# Altium footprint library pcb_esp32.PcbLib: 1 footprints
Each footprint in its own frame and in the unit in brackets; x right, y up, seen from the top. Pads: shape width x height; smd on the part's side, far side on the other; paste and mask are expansions set on the pad; w line width, h text height; cw(c..) or ccw(c..) is an arc to the next point about the centre after c.
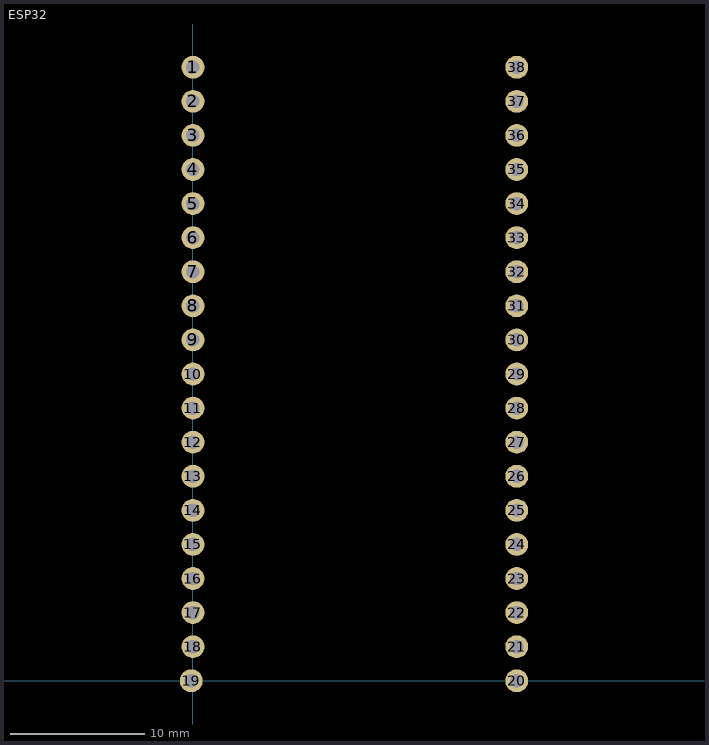
[diagram p0: the footprint, top view; thin cyan lines are the x and y axes]

## ESP32 [mm]
pads (38):
  round 1.7 hole 1: 1(0,45.72) 2(0,43.18) 3(0,40.64) 4(0,38.1) 5(0,35.56) 6(0,33.02) 7(0,30.48) 8(0,27.94) 9(0,25.4) 10(0,22.86) 11(0,20.32) 12(0,17.78) 13(0,15.24) 14(0,12.7) 15(0,10.16) 16(0,7.62) 17(0,5.08) 18(0,2.54) 19(-0.127,0) 20(24.13,0) 21(24.13,2.54) 22(24.13,5.08) 23(24.13,7.62) 24(24.13,10.16) 25(24.13,12.7) 26(24.13,15.24) 27(24.13,17.78) 28(24.13,20.32) 29(24.13,22.86) 30(24.13,25.4) 31(24.13,27.94) 32(24.13,30.48) 33(24.13,33.02) 34(24.13,35.56) 35(24.13,38.1) 36(24.13,40.64) 37(24.13,43.18) 38(24.13,45.72)
3D body "NodeMCU38_without_socket.step": height 4.69, standoff -8.62, extent -1.735,-5.722 26.84,50.848